# Altium schematic symbol library MBR120VLSFT1G.SchLib: 1 symbol
Pins are listed as number, name and electrical type; pins without a type are passive.

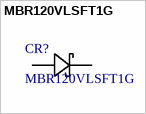
[diagram p0: symbol MBR120VLSFT1G]

## MBR120VLSFT1G
designator CR?
No Description Available; Manufacturer_Name: onsemi; Copyright: Copyright (C) 2026 Ultra Librarian. All rights reserved.; Manufacturer_Part_Number: MBR120VLSFT1G
footprint SDO_SOD-123FL_ONS
pins: 1, 2